# Altium footprint library WR-TBL_Pluggable Connector_5.08mm.PcbLib: 295 footprints (part 15 of 19)
Each footprint in its own frame and in the unit in brackets; x right, y up, seen from the top. Pads: shape width x height; smd on the part's side, far side on the other; paste and mask are expansions set on the pad; w line width, h text height; cw(c..) or ccw(c..) is an arc to the next point about the centre after c.
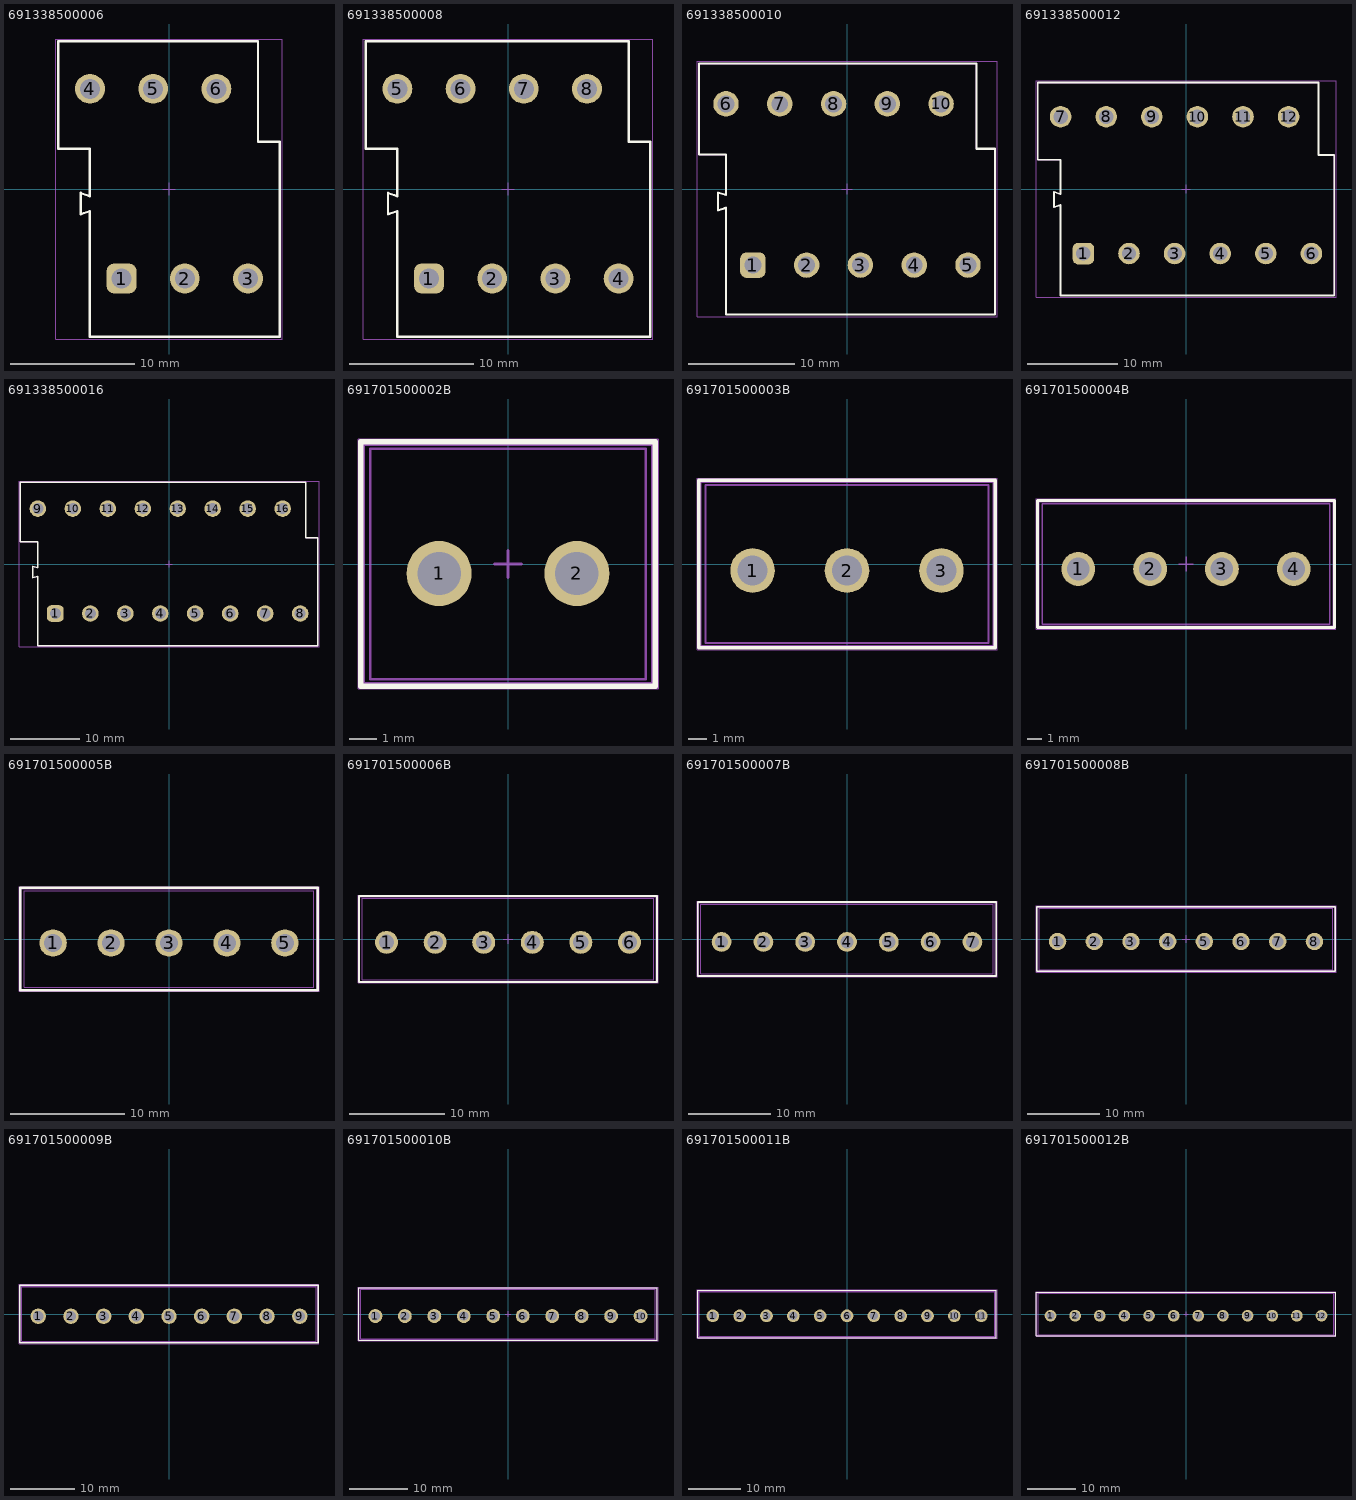
[diagram p14: the footprints below, top view; thin cyan lines are the x and y axes]

## 691338500006 [mm] "Double Level Vertical Male PCB Header, pitch 5.08mm, 06p"
height 22
pads (6):
  rrect50% 2.4x2.4 hole 1.6: 1(-3.81,-7.19)
  round 2.4 hole 1.6: 2(1.27,-7.19) 3(6.35,-7.19) 4(-6.35,8.05) 5(-1.27,8.05) 6(3.81,8.05)
Top Overlay:
  lines w0.2: -8.89,3.25 -8.89,11.85 7.15,11.85 7.15,3.8 8.89,3.8 8.89,-11.85 -6.35,-11.85 -6.35,-1.77 -7.1,-2.02 -7.1,-0.32 -6.35,-0.57 -6.35,3.25 -8.89,3.25
Top Assembly:
  lines w0.1: -8.89,3.25 -6.35,3.25 -6.35,-0.57 -7.1,-0.32 -7.1,-2.02 -6.35,-1.77 -6.35,-11.85 8.89,-11.85 8.89,3.8 7.15,3.8 7.15,11.85 -8.89,11.85 -8.89,3.25
Top Designator:
  text ".Designator" at -3.647,-0.357 h1
Top 3D Body:
  lines w0.1: -8.89,3.25 -8.89,11.85 7.15,11.85 7.15,3.8 8.89,3.8 8.89,-11.85 -6.35,-11.85 -6.35,-1.77 -7.1,-2.02 -7.1,-0.32 -6.35,-0.57 -6.35,3.25 -8.89,3.25
Top Courtyard:
  lines w0.05: -9.09,-12.05 9.09,-12.05 9.09,12.05 -9.09,12.05 -9.09,-12.05
Top Component Center:
  lines w0.1: -0.5,0 0.5,0 ; 0,-0.5 0,0.5
3D body "691338500006.stp": height 22.1, standoff -3.8, extent -8.89,-11.85 8.89,11.85

## 691338500008 [mm] "Double Level Vertical Male PCB Header, pitch 5.08mm, 08p"
height 22
pads (8):
  rrect50% 2.4x2.4 hole 1.6: 1(-6.35,-7.19)
  round 2.4 hole 1.6: 2(-1.27,-7.19) 3(3.81,-7.19) 4(8.89,-7.19) 5(-8.89,8.05) 6(-3.81,8.05) 7(1.27,8.05) 8(6.35,8.05)
Top Overlay:
  lines w0.2: -11.43,3.25 -8.89,3.25 -8.89,-0.57 -9.64,-0.32 -9.64,-2.02 -8.89,-1.77 -8.89,-11.85 11.43,-11.85 11.43,3.8 9.69,3.8 9.69,11.85 -11.43,11.85 -11.43,3.25
Top Assembly:
  lines w0.1: -11.43,3.25 -11.43,11.85 9.69,11.85 9.69,3.8 11.43,3.8 11.43,-11.85 -8.89,-11.85 -8.89,-1.77 -9.64,-2.02 -9.64,-0.32 -8.89,-0.57 -8.89,3.25 -11.43,3.25
Top Designator:
  text ".Designator" at -3.647,-0.357 h1
Top 3D Body:
  lines w0.1: -11.43,3.25 -8.89,3.25 -8.89,-0.57 -9.64,-0.32 -9.64,-2.02 -8.89,-1.77 -8.89,-11.85 11.43,-11.85 11.43,3.8 9.69,3.8 9.69,11.85 -11.43,11.85 -11.43,3.25
Top Courtyard:
  lines w0.05: -11.63,-12.05 -11.63,12.05 11.63,12.05 11.63,-12.05 -11.63,-12.05
Top Component Center:
  lines w0.1: -0.5,0 0.5,0 ; 0,-0.5 0,0.5
3D body "691338500008.stp": height 22.1, standoff -3.8, extent -11.43,-11.85 11.43,11.85

## 691338500010 [mm] "Double Level Vertical Male PCB Header, pitch 5.08mm, 10p"
height 22
pads (10):
  rrect50% 2.4x2.4 hole 1.6: 1(-8.89,-7.19)
  round 2.4 hole 1.6: 2(-3.81,-7.19) 3(1.27,-7.19) 4(6.35,-7.19) 5(11.43,-7.19) 6(-11.43,8.05) 7(-6.35,8.05) 8(-1.27,8.05) 9(3.81,8.05) 10(8.89,8.05)
Top Overlay:
  lines w0.2: -13.97,3.25 -13.97,11.85 12.23,11.85 12.23,3.8 13.97,3.8 13.97,-11.85 -11.43,-11.85 -11.43,-1.77 -12.18,-2.02 -12.18,-0.32 -11.43,-0.57 -11.43,3.25 -13.97,3.25
Top Assembly:
  lines w0.1: -13.97,3.25 -11.43,3.25 -11.43,-0.57 -12.18,-0.32 -12.18,-2.02 -11.43,-1.77 -11.43,-11.85 13.97,-11.85 13.97,3.8 12.23,3.8 12.23,11.85 -13.97,11.85 -13.97,3.25
Top Designator:
  text ".Designator" at -3.647,-0.357 h1
Top 3D Body:
  lines w0.1: -13.97,3.25 -13.97,11.85 12.23,11.85 12.23,3.8 13.97,3.8 13.97,-11.85 -11.43,-11.85 -11.43,-1.77 -12.18,-2.02 -12.18,-0.32 -11.43,-0.57 -11.43,3.25 -13.97,3.25
Top Courtyard:
  lines w0.05: -14.17,-12.05 14.17,-12.05 14.17,12.05 -14.17,12.05 -14.17,-12.05
Top Component Center:
  lines w0.1: -0.5,0 0.5,0 ; 0,-0.5 0,0.5
3D body "691338500010.stp": height 22.1, standoff -3.8, extent -13.97,-11.85 13.97,11.85

## 691338500012 [mm] "Double Level Vertical Male PCB Header, pitch 5.08mm, 12p"
height 22
pads (12):
  rrect50% 2.4x2.4 hole 1.6: 1(-11.43,-7.19)
  round 2.4 hole 1.6: 2(-6.35,-7.19) 3(-1.27,-7.19) 4(3.81,-7.19) 5(8.89,-7.19) 6(13.97,-7.19) 7(-13.97,8.05) 8(-8.89,8.05) 9(-3.81,8.05) 10(1.27,8.05) 11(6.35,8.05) 12(11.43,8.05)
Top Overlay:
  lines w0.2: -16.51,3.25 -16.51,11.85 14.77,11.85 14.77,3.8 16.51,3.8 16.51,-11.85 -13.97,-11.85 -13.97,-1.77 -14.72,-2.02 -14.72,-0.32 -13.97,-0.57 -13.97,3.25 -16.51,3.25
Top Assembly:
  lines w0.1: -16.51,3.25 -13.97,3.25 -13.97,-0.57 -14.72,-0.32 -14.72,-2.02 -13.97,-1.77 -13.97,-11.85 16.51,-11.85 16.51,3.8 14.77,3.8 14.77,11.85 -16.51,11.85 -16.51,3.25
Top Designator:
  text ".Designator" at -3.647,-0.357 h1
Top 3D Body:
  lines w0.1: -16.51,3.25 -16.51,11.85 14.77,11.85 14.77,3.8 16.51,3.8 16.51,-11.85 -13.97,-11.85 -13.97,-1.77 -14.72,-2.02 -14.72,-0.32 -13.97,-0.57 -13.97,3.25 -16.51,3.25
Top Courtyard:
  lines w0.05: -16.71,-12.05 16.71,-12.05 16.71,12.05 -16.71,12.05 -16.71,-12.05
Top Component Center:
  lines w0.1: -0.5,0 0.5,0 ; 0,-0.5 0,0.5
3D body "691338500012.stp": height 22.1, standoff -3.8, extent -16.51,-11.85 16.51,11.85

## 691338500016 [mm] "Double Level Vertical Male PCB Header, pitch 5.08mm, 16p"
height 22
pads (16):
  rrect50% 2.4x2.4 hole 1.6: 1(-16.51,-7.19)
  round 2.4 hole 1.6: 2(-11.43,-7.19) 3(-6.35,-7.19) 4(-1.27,-7.19) 5(3.81,-7.19) 6(8.89,-7.19) 7(13.97,-7.19) 8(19.05,-7.19) 9(-19.05,8.05) 10(-13.97,8.05) 11(-8.89,8.05) 12(-3.81,8.05) 13(1.27,8.05) 14(6.35,8.05) 15(11.43,8.05) 16(16.51,8.05)
Top Overlay:
  lines w0.2: -21.59,3.25 -21.59,11.85 19.85,11.85 19.85,3.8 21.59,3.8 21.59,-11.85 -19.05,-11.85 -19.05,-1.77 -19.8,-2.02 -19.8,-0.32 -19.05,-0.57 -19.05,3.25 -21.59,3.25
Top Assembly:
  lines w0.1: -21.59,3.25 -19.05,3.25 -19.05,-0.57 -19.8,-0.32 -19.8,-2.02 -19.05,-1.77 -19.05,-11.85 21.59,-11.85 21.59,3.8 19.85,3.8 19.85,11.85 -21.59,11.85 -21.59,3.25
Top Designator:
  text ".Designator" at -3.647,-0.357 h1
Top 3D Body:
  lines w0.1: -21.59,3.25 -21.59,11.85 19.85,11.85 19.85,3.8 21.59,3.8 21.59,-11.85 -19.05,-11.85 -19.05,-1.77 -19.8,-2.02 -19.8,-0.32 -19.05,-0.57 -19.05,3.25 -21.59,3.25
Top Courtyard:
  lines w0.05: -21.79,-12.05 21.79,-12.05 21.79,12.05 -21.79,12.05 -21.79,-12.05
Top Component Center:
  lines w0.1: -0.5,0 0.5,0 ; 0,-0.5 0,0.5
3D body "691338500016.stp": height 22.1, standoff -3.8, extent -21.59,-11.85 21.59,11.85

## 691701500002B [mm] "THR - 5,08mm - PCB Vertical Open - 02p"
height 12
pads (2):
  round 2.4 hole 1.6: 1(-2.54,-0.35) 2(2.54,-0.35)
Top Overlay:
  lines w0.2: -5.43,-4.5 -5.43,4.5 5.43,4.5 5.43,-4.5 -5.43,-4.5
Top Paste:
  region: -4.54,1.5 -0.54,1.5 -0.54,-2.2 -4.54,-2.2
  region: 0.54,1.5 4.54,1.5 4.54,-2.2 0.54,-2.2
Assembly Notes:
  text "Stencil thickness : 120 μm" at -5.156,-5.301 h1
Top Assembly:
  lines w0.1: -5.33,-4.4 5.33,-4.4 5.33,4.4 -5.33,4.4 -5.33,-4.4
Top Designator:
  text ".Designator" at -3.647,-0.357 h1
Top 3D Body:
  lines w0.1: -5.08,-4.25 5.08,-4.25 5.08,4.25 -5.08,4.25 -5.08,-4.25
Top Courtyard:
  lines w0.05: -5.53,-4.6 -5.53,4.6 5.53,4.6 5.53,-4.6 -5.53,-4.6
Top Component Center:
  lines w0.1: -0.5,0 0.5,0 ; 0,-0.5 0,0.5
3D body "691701500002B.stp": height 12.05, standoff -2.55, extent -5.08,-4.25 5.08,4.25

## 691701500003B [mm] "THR - 5,08mm - PCB Vertical Open - 03p"
height 12
pads (3):
  round 2.4 hole 1.6: 1(-5.08,-0.35) 2(0,-0.35) 3(5.08,-0.35)
Top Overlay:
  lines w0.2: -7.97,-4.5 7.97,-4.5 7.97,4.5 -7.97,4.5 -7.97,-4.5
Top Paste:
  region: 3.08,1.5 7.08,1.5 7.08,-2.2 3.08,-2.2
  region: -7.08,1.5 -3.08,1.5 -3.08,-2.2 -7.08,-2.2
  region: -2,1.5 2,1.5 2,-2.2 -2,-2.2
Assembly Notes:
  text "Stencil thickness : 120 μm" at -5.156,-5.301 h1
Top Assembly:
  lines w0.1: -7.87,-4.4 -7.87,4.4 7.87,4.4 7.87,-4.4 -7.87,-4.4
Top Designator:
  text ".Designator" at -3.647,-0.357 h1
Top 3D Body:
  lines w0.1: -7.62,-4.25 -7.62,4.25 7.62,4.25 7.62,-4.25 -7.62,-4.25
Top Courtyard:
  lines w0.05: -8.07,-4.6 8.07,-4.6 8.07,4.6 -8.07,4.6 -8.07,-4.6
Top Component Center:
  lines w0.1: -0.5,0 0.5,0 ; 0,-0.5 0,0.5
3D body "691701500003B.stp": height 12.05, standoff -2.55, extent -7.62,-4.25 7.62,4.25

## 691701500004B [mm] "THR - 5,08mm - PCB Vertical Open - 04p"
height 12
pads (4):
  round 2.4 hole 1.6: 1(-7.62,-0.35) 2(-2.54,-0.35) 3(2.54,-0.35) 4(7.62,-0.35)
Top Overlay:
  lines w0.2: -10.51,-4.5 -10.51,4.5 10.51,4.5 10.51,-4.5 -10.51,-4.5
Top Paste:
  region: 5.62,1.5 9.62,1.5 9.62,-2.2 5.62,-2.2
  region: 0.54,1.5 4.54,1.5 4.54,-2.2 0.54,-2.2
  region: -9.62,1.5 -5.62,1.5 -5.62,-2.2 -9.62,-2.2
  region: -4.54,1.5 -0.54,1.5 -0.54,-2.2 -4.54,-2.2
Assembly Notes:
  text "Stencil thickness : 120 μm" at -5.156,-5.301 h1
Top Assembly:
  lines w0.1: -10.41,-4.4 10.41,-4.4 10.41,4.4 -10.41,4.4 -10.41,-4.4
Top Designator:
  text ".Designator" at -3.647,-0.357 h1
Top 3D Body:
  lines w0.1: -10.16,-4.25 10.16,-4.25 10.16,4.25 -10.16,4.25 -10.16,-4.25
Top Courtyard:
  lines w0.05: -10.61,-4.6 -10.61,4.6 10.61,4.6 10.61,-4.6 -10.61,-4.6
Top Component Center:
  lines w0.1: -0.5,0 0.5,0 ; 0,-0.5 0,0.5
3D body "691701500004B.stp": height 12.05, standoff -2.55, extent -10.16,-4.25 10.16,4.25

## 691701500005B [mm] "THR - 5,08mm - PCB Vertical Open - 05p"
height 12
pads (5):
  round 2.4 hole 1.6: 1(-10.16,-0.35) 2(-5.08,-0.35) 3(0,-0.35) 4(5.08,-0.35) 5(10.16,-0.35)
Top Overlay:
  lines w0.2: -13.05,-4.5 13.05,-4.5 13.05,4.5 -13.05,4.5 -13.05,-4.5
Top Paste:
  region: 8.16,1.5 12.16,1.5 12.16,-2.2 8.16,-2.2
  region: -7.08,1.5 -3.08,1.5 -3.08,-2.2 -7.08,-2.2
  region: -12.16,1.5 -8.16,1.5 -8.16,-2.2 -12.16,-2.2
  region: -2,1.5 2,1.5 2,-2.2 -2,-2.2
  region: 3.08,1.5 7.08,1.5 7.08,-2.2 3.08,-2.2
Assembly Notes:
  text "Stencil thickness : 120 μm" at -5.156,-5.301 h1
Top Assembly:
  lines w0.1: -12.95,-4.4 -12.95,4.4 12.95,4.4 12.95,-4.4 -12.95,-4.4
Top Designator:
  text ".Designator" at -3.647,-0.357 h1
Top 3D Body:
  lines w0.1: -12.7,-4.25 -12.7,4.25 12.7,4.25 12.7,-4.25 -12.7,-4.25
Top Courtyard:
  lines w0.05: -13.15,-4.6 13.15,-4.6 13.15,4.6 -13.15,4.6 -13.15,-4.6
Top Component Center:
  lines w0.1: -0.5,0 0.5,0 ; 0,-0.5 0,0.5
3D body "691701500005B.stp": height 12.05, standoff -2.55, extent -12.7,-4.25 12.7,4.25

## 691701500006B [mm] "THR - 5,08mm - PCB Vertical Open - 06p"
height 12
pads (6):
  round 2.4 hole 1.6: 1(-12.7,-0.35) 2(-7.62,-0.35) 3(-2.54,-0.35) 4(2.54,-0.35) 5(7.62,-0.35) 6(12.7,-0.35)
Top Overlay:
  lines w0.2: -15.59,-4.5 15.59,-4.5 15.59,4.5 -15.59,4.5 -15.59,-4.5
Top Paste:
  region: 0.54,1.5 4.54,1.5 4.54,-2.2 0.54,-2.2
  region: -4.54,1.5 -0.54,1.5 -0.54,-2.2 -4.54,-2.2
  region: -14.7,1.5 -10.7,1.5 -10.7,-2.2 -14.7,-2.2
  region: -9.62,1.5 -5.62,1.5 -5.62,-2.2 -9.62,-2.2
  region: 5.62,1.5 9.62,1.5 9.62,-2.2 5.62,-2.2
  region: 10.7,1.5 14.7,1.5 14.7,-2.2 10.7,-2.2
Assembly Notes:
  text "Stencil thickness : 120 μm" at -5.156,-5.301 h1
Top Assembly:
  lines w0.1: -15.49,-4.4 -15.49,4.4 15.49,4.4 15.49,-4.4 -15.49,-4.4
Top Designator:
  text ".Designator" at -3.647,-0.357 h1
Top 3D Body:
  lines w0.1: -15.24,-4.25 -15.24,4.25 15.24,4.25 15.24,-4.25 -15.24,-4.25
Top Courtyard:
  lines w0.05: -15.69,-4.6 15.69,-4.6 15.69,4.6 -15.69,4.6 -15.69,-4.6
Top Component Center:
  lines w0.1: -0.5,0 0.5,0 ; 0,-0.5 0,0.5
3D body "691701500006B.stp": height 12.05, standoff -2.55, extent -15.24,-4.25 15.24,4.25

## 691701500007B [mm] "THR - 5,08mm - PCB Vertical Open - 07p"
height 12
pads (7):
  round 2.4 hole 1.6: 1(-15.24,-0.35) 2(-10.16,-0.35) 3(-5.08,-0.35) 4(0,-0.35) 5(5.08,-0.35) 6(10.16,-0.35) 7(15.24,-0.35)
Top Overlay:
  lines w0.2: -18.13,-4.5 18.13,-4.5 18.13,4.5 -18.13,4.5 -18.13,-4.5
Top Paste:
  region: 8.16,1.5 12.16,1.5 12.16,-2.2 8.16,-2.2
  region: 3.08,1.5 7.08,1.5 7.08,-2.2 3.08,-2.2
  region: -12.16,1.5 -8.16,1.5 -8.16,-2.2 -12.16,-2.2
  region: -17.24,1.5 -13.24,1.5 -13.24,-2.2 -17.24,-2.2
  region: -7.08,1.5 -3.08,1.5 -3.08,-2.2 -7.08,-2.2
  region: -2,1.5 2,1.5 2,-2.2 -2,-2.2
  region: 13.24,1.5 17.24,1.5 17.24,-2.2 13.24,-2.2
Assembly Notes:
  text "Stencil thickness : 120 μm" at -5.156,-5.301 h1
Top Assembly:
  lines w0.1: -18.03,-4.4 -18.03,4.4 18.03,4.4 18.03,-4.4 -18.03,-4.4
Top Designator:
  text ".Designator" at -3.647,-0.357 h1
Top 3D Body:
  lines w0.1: -17.78,-4.25 -17.78,4.25 17.78,4.25 17.78,-4.25 -17.78,-4.25
Top Courtyard:
  lines w0.05: -18.23,-4.6 18.23,-4.6 18.23,4.6 -18.23,4.6 -18.23,-4.6
Top Component Center:
  lines w0.1: -0.5,0 0.5,0 ; 0,-0.5 0,0.5
3D body "691701500007B.stp": height 12.05, standoff -2.55, extent -17.78,-4.25 17.78,4.25

## 691701500008B [mm] "THR - 5,08mm - PCB Vertical Open - 08p"
height 12
pads (8):
  round 2.4 hole 1.6: 1(-17.78,-0.35) 2(-12.7,-0.35) 3(-7.62,-0.35) 4(-2.54,-0.35) 5(2.54,-0.35) 6(7.62,-0.35) 7(12.7,-0.35) 8(17.78,-0.35)
Top Overlay:
  lines w0.2: -20.67,-4.5 20.67,-4.5 20.67,4.5 -20.67,4.5 -20.67,-4.5
Top Paste:
  region: 10.7,1.5 14.7,1.5 14.7,-2.2 10.7,-2.2
  region: -4.54,1.5 -0.54,1.5 -0.54,-2.2 -4.54,-2.2
  region: -9.62,1.5 -5.62,1.5 -5.62,-2.2 -9.62,-2.2
  region: -19.78,1.5 -15.78,1.5 -15.78,-2.2 -19.78,-2.2
  region: -14.7,1.5 -10.7,1.5 -10.7,-2.2 -14.7,-2.2
  region: 0.54,1.5 4.54,1.5 4.54,-2.2 0.54,-2.2
  region: 5.62,1.5 9.62,1.5 9.62,-2.2 5.62,-2.2
  region: 15.78,1.5 19.78,1.5 19.78,-2.2 15.78,-2.2
Assembly Notes:
  text "Stencil thickness : 120 μm" at -5.156,-5.301 h1
Top Assembly:
  lines w0.1: -20.57,-4.4 -20.57,4.4 20.57,4.4 20.57,-4.4 -20.57,-4.4
Top Designator:
  text ".Designator" at -3.647,-0.357 h1
Top 3D Body:
  lines w0.1: -20.32,-4.25 -20.32,4.25 20.32,4.25 20.32,-4.25 -20.32,-4.25
Top Courtyard:
  lines w0.05: -20.77,-4.6 20.77,-4.6 20.77,4.6 -20.77,4.6 -20.77,-4.6
Top Component Center:
  lines w0.1: -0.5,0 0.5,0 ; 0,-0.5 0,0.5
3D body "691701500008B.stp": height 12.05, standoff -2.55, extent -20.32,-4.25 20.32,4.25

## 691701500009B [mm] "THR - 5,08mm - PCB Vertical Open - 09p"
height 12
pads (9):
  round 2.4 hole 1.6: 1(-20.32,-0.35) 2(-15.24,-0.35) 3(-10.16,-0.35) 4(-5.08,-0.35) 5(0,-0.35) 6(5.08,-0.35) 7(10.16,-0.35) 8(15.24,-0.35) 9(20.32,-0.35)
Top Overlay:
  lines w0.2: -23.21,-4.5 23.21,-4.5 23.21,4.5 -23.21,4.5 -23.21,-4.5
Top Paste:
  region: 18.32,1.5 22.32,1.5 22.32,-2.2 18.32,-2.2
  region: 13.24,1.5 17.24,1.5 17.24,-2.2 13.24,-2.2
  region: 3.08,1.5 7.08,1.5 7.08,-2.2 3.08,-2.2
  region: -2,1.5 2,1.5 2,-2.2 -2,-2.2
  region: -17.24,1.5 -13.24,1.5 -13.24,-2.2 -17.24,-2.2
  region: -22.32,1.5 -18.32,1.5 -18.32,-2.2 -22.32,-2.2
  region: -12.16,1.5 -8.16,1.5 -8.16,-2.2 -12.16,-2.2
  region: -7.08,1.5 -3.08,1.5 -3.08,-2.2 -7.08,-2.2
  region: 8.16,1.5 12.16,1.5 12.16,-2.2 8.16,-2.2
Assembly Notes:
  text "Stencil thickness : 120 μm" at -5.156,-5.301 h1
Top Assembly:
  lines w0.1: -23.11,-4.4 -23.11,4.4 23.11,4.4 23.11,-4.4 -23.11,-4.4
Top Designator:
  text ".Designator" at -3.647,-0.357 h1
Top 3D Body:
  lines w0.1: -22.86,-4.25 -22.86,4.25 22.86,4.25 22.86,-4.25 -22.86,-4.25
Top Courtyard:
  lines w0.05: -23.31,-4.6 23.31,-4.6 23.31,4.6 -23.31,4.6 -23.31,-4.6
Top Component Center:
  lines w0.1: -0.5,0 0.5,0 ; 0,-0.5 0,0.5
3D body "691701500009B.stp": height 12.05, standoff -2.55, extent -22.86,-4.25 22.86,4.25

## 691701500010B [mm] "THR - 5,08mm - PCB Vertical Open - 10p"
height 12
pads (10):
  round 2.4 hole 1.6: 1(-22.86,-0.35) 2(-17.78,-0.35) 3(-12.7,-0.35) 4(-7.62,-0.35) 5(-2.54,-0.35) 6(2.54,-0.35) 7(7.62,-0.35) 8(12.7,-0.35) 9(17.78,-0.35) 10(22.86,-0.35)
Top Overlay:
  lines w0.2: -25.75,-4.5 25.75,-4.5 25.75,4.5 -25.75,4.5 -25.75,-4.5
Top Paste:
  region: 5.62,1.5 9.62,1.5 9.62,-2.2 5.62,-2.2
  region: -9.62,1.5 -5.62,1.5 -5.62,-2.2 -9.62,-2.2
  region: -14.7,1.5 -10.7,1.5 -10.7,-2.2 -14.7,-2.2
  region: -24.86,1.5 -20.86,1.5 -20.86,-2.2 -24.86,-2.2
  region: -19.78,1.5 -15.78,1.5 -15.78,-2.2 -19.78,-2.2
  region: -4.54,1.5 -0.54,1.5 -0.54,-2.2 -4.54,-2.2
  region: 0.54,1.5 4.54,1.5 4.54,-2.2 0.54,-2.2
  region: 10.7,1.5 14.7,1.5 14.7,-2.2 10.7,-2.2
  region: 15.78,1.5 19.78,1.5 19.78,-2.2 15.78,-2.2
  region: 20.86,1.5 24.86,1.5 24.86,-2.2 20.86,-2.2
Assembly Notes:
  text "Stencil thickness : 120 μm" at -5.156,-5.301 h1
Top Assembly:
  lines w0.1: -25.65,-4.4 -25.65,4.4 25.65,4.4 25.65,-4.4 -25.65,-4.4
Top Designator:
  text ".Designator" at -3.647,-0.357 h1
Top 3D Body:
  lines w0.1: -25.4,-4.25 -25.4,4.25 25.4,4.25 25.4,-4.25 -25.4,-4.25
Top Courtyard:
  lines w0.05: -25.85,-4.6 25.85,-4.6 25.85,4.6 -25.85,4.6 -25.85,-4.6
Top Component Center:
  lines w0.1: -0.5,0 0.5,0 ; 0,-0.5 0,0.5
3D body "691701500010B.stp": height 12.05, standoff -2.55, extent -25.4,-4.25 25.4,4.25

## 691701500011B [mm] "THR - 5,08mm - PCB Vertical Open - 11p"
height 12
pads (11):
  round 2.4 hole 1.6: 1(-25.4,-0.35) 2(-20.32,-0.35) 3(-15.24,-0.35) 4(-10.16,-0.35) 5(-5.08,-0.35) 6(0,-0.35) 7(5.08,-0.35) 8(10.16,-0.35) 9(15.24,-0.35) 10(20.32,-0.35) 11(25.4,-0.35)
Top Overlay:
  lines w0.2: -28.29,-4.5 28.29,-4.5 28.29,4.5 -28.29,4.5 -28.29,-4.5
Top Paste:
  region: 3.08,1.5 7.08,1.5 7.08,-2.2 3.08,-2.2
  region: -12.16,1.5 -8.16,1.5 -8.16,-2.2 -12.16,-2.2
  region: -17.24,1.5 -13.24,1.5 -13.24,-2.2 -17.24,-2.2
  region: -27.4,1.5 -23.4,1.5 -23.4,-2.2 -27.4,-2.2
  region: -22.32,1.5 -18.32,1.5 -18.32,-2.2 -22.32,-2.2
  region: -7.08,1.5 -3.08,1.5 -3.08,-2.2 -7.08,-2.2
  region: -2,1.5 2,1.5 2,-2.2 -2,-2.2
  region: 8.16,1.5 12.16,1.5 12.16,-2.2 8.16,-2.2
  region: 13.24,1.5 17.24,1.5 17.24,-2.2 13.24,-2.2
  region: 18.32,1.5 22.32,1.5 22.32,-2.2 18.32,-2.2
  region: 23.4,1.5 27.4,1.5 27.4,-2.2 23.4,-2.2
Assembly Notes:
  text "Stencil thickness : 120 μm" at -5.156,-5.301 h1
Top Assembly:
  lines w0.1: -28.19,-4.4 -28.19,4.4 28.19,4.4 28.19,-4.4 -28.19,-4.4
Top Designator:
  text ".Designator" at -3.647,-0.357 h1
Top 3D Body:
  lines w0.1: -27.94,-4.25 -27.94,4.25 27.94,4.25 27.94,-4.25 -27.94,-4.25
Top Courtyard:
  lines w0.05: -28.39,-4.6 28.39,-4.6 28.39,4.6 -28.39,4.6 -28.39,-4.6
Top Component Center:
  lines w0.1: -0.5,0 0.5,0 ; 0,-0.5 0,0.5
3D body "691701500011B.stp": height 12.05, standoff -2.55, extent -27.94,-4.25 27.94,4.25

## 691701500012B [mm] "THR - 5,08mm - PCB Vertical Open - 12p"
height 12
pads (12):
  round 2.4 hole 1.6: 1(-27.94,-0.35) 2(-22.86,-0.35) 3(-17.78,-0.35) 4(-12.7,-0.35) 5(-7.62,-0.35) 6(-2.54,-0.35) 7(2.54,-0.35) 8(7.62,-0.35) 9(12.7,-0.35) 10(17.78,-0.35) 11(22.86,-0.35) 12(27.94,-0.35)
Top Overlay:
  lines w0.2: -30.83,-4.5 -30.83,4.5 30.83,4.5 30.83,-4.5 -30.83,-4.5
Top Paste:
  region: 25.94,1.5 29.94,1.5 29.94,-2.2 25.94,-2.2
  region: 0.54,1.5 4.54,1.5 4.54,-2.2 0.54,-2.2
  region: -14.7,1.5 -10.7,1.5 -10.7,-2.2 -14.7,-2.2
  region: -19.78,1.5 -15.78,1.5 -15.78,-2.2 -19.78,-2.2
  region: -29.94,1.5 -25.94,1.5 -25.94,-2.2 -29.94,-2.2
  region: -24.86,1.5 -20.86,1.5 -20.86,-2.2 -24.86,-2.2
  region: -9.62,1.5 -5.62,1.5 -5.62,-2.2 -9.62,-2.2
  region: -4.54,1.5 -0.54,1.5 -0.54,-2.2 -4.54,-2.2
  region: 5.62,1.5 9.62,1.5 9.62,-2.2 5.62,-2.2
  region: 10.7,1.5 14.7,1.5 14.7,-2.2 10.7,-2.2
  region: 15.78,1.5 19.78,1.5 19.78,-2.2 15.78,-2.2
  region: 20.86,1.5 24.86,1.5 24.86,-2.2 20.86,-2.2
Assembly Notes:
  text "Stencil thickness : 120 μm" at -5.156,-5.301 h1
Top Assembly:
  lines w0.1: -30.73,-4.4 30.73,-4.4 30.73,4.4 -30.73,4.4 -30.73,-4.4
Top Designator:
  text ".Designator" at -3.647,-0.357 h1
Top 3D Body:
  lines w0.1: -30.48,-4.25 30.48,-4.25 30.48,4.25 -30.48,4.25 -30.48,-4.25
Top Courtyard:
  lines w0.05: -30.93,-4.6 -30.93,4.6 30.93,4.6 30.93,-4.6 -30.93,-4.6
Top Component Center:
  lines w0.1: -0.5,0 0.5,0 ; 0,-0.5 0,0.5
3D body "691701500012B.stp": height 12.05, standoff -2.55, extent -30.48,-4.25 30.48,4.25